# Altium footprint library PCB_BQ51013BYFPR.PcbLib: 17 footprints (part 2 of 2)
Each footprint in its own frame and in the unit in brackets; x right, y up, seen from the top. Pads: shape width x height; smd on the part's side, far side on the other; paste and mask are expansions set on the pad; w line width, h text height; cw(c..) or ccw(c..) is an arc to the next point about the centre after c.
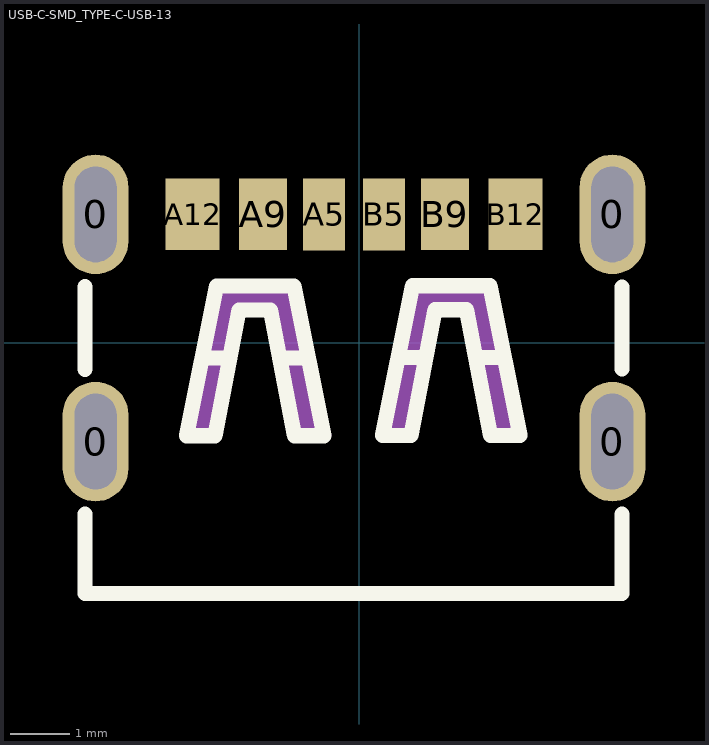
[diagram p1: the footprint, top view; thin cyan lines are the x and y axes]

## USB-C-SMD_TYPE-C-USB-13 [mm]
height 2.65
pads (10):
  oval 1.1x2 hole 0.7 slot 1.6 at 90 deg: 0(-4.407,-1.652) 0(-4.407,2.148) 0(4.233,-1.652) 0(4.233,2.148)
  rect 0.7x1.2 smd: A5(-0.587,2.146) B5(0.413,2.146)
  rect 0.8x1.2 smd: A9(-1.607,2.148) B9(1.433,2.15)
  rect 0.9x1.2 smd: A12(-2.787,2.148) B12(2.613,2.148)
Top Overlay:
  lines w0.254: -4.587,-2.862 -4.587,-4.191 4.393,-4.191 4.393,-2.867 ; -4.587,-0.442 -4.587,0.938 ; -2.586,-0.253 -2.188,-0.253 ; -1.287,-0.252 -0.887,-0.252 ; 0.69,-0.247 1.089,-0.247 ; 1.99,-0.247 2.39,-0.247 ; 4.393,-0.438 4.393,0.933 ; -2.886,-1.553 -2.411,-1.553 -2.01,0.548 -1.481,0.548 -1.083,-1.553 -0.587,-1.553 -1.088,0.949 -2.388,0.949 -2.886,-1.553 ; 0.391,-1.548 0.866,-1.548 1.267,0.553 1.795,0.553 2.194,-1.548 2.689,-1.548 2.189,0.954 0.889,0.954 0.391,-1.548
Top Paste:
  region: -4.957,2.598 -4.957,2.707 -4.873,2.909 -4.719,3.064 -4.516,3.148 -4.298,3.148 -4.095,3.064 -3.941,2.909 -3.857,2.707 -3.857,2.598 -3.857,1.698 -3.857,1.588 -3.941,1.386 -4.095,1.231 -4.298,1.148 -4.516,1.148 -4.719,1.231 -4.873,1.386 -4.957,1.588 -4.957,1.698
  region: 3.683,2.598 3.683,2.707 3.767,2.909 3.921,3.064 4.124,3.148 4.342,3.148 4.545,3.064 4.699,2.909 4.783,2.707 4.783,2.598 4.783,1.698 4.783,1.588 4.699,1.386 4.545,1.231 4.342,1.148 4.124,1.148 3.921,1.231 3.767,1.386 3.683,1.588 3.683,1.698
  region: 3.683,-1.202 3.683,-1.093 3.767,-0.891 3.921,-0.736 4.124,-0.652 4.342,-0.652 4.545,-0.736 4.699,-0.891 4.783,-1.093 4.783,-1.202 4.783,-2.102 4.783,-2.212 4.699,-2.414 4.545,-2.569 4.342,-2.652 4.124,-2.652 3.921,-2.569 3.767,-2.414 3.683,-2.212 3.683,-2.102
  region: -4.957,-1.202 -4.957,-1.093 -4.873,-0.891 -4.719,-0.736 -4.516,-0.652 -4.298,-0.652 -4.095,-0.736 -3.941,-0.891 -3.857,-1.093 -3.857,-1.202 -3.857,-2.102 -3.857,-2.212 -3.941,-2.414 -4.095,-2.569 -4.298,-2.652 -4.516,-2.652 -4.719,-2.569 -4.873,-2.414 -4.957,-2.212 -4.957,-2.102
  region: -3.237,2.748 -2.337,2.748 -2.337,1.548 -3.237,1.548
  region: -2.007,2.748 -1.207,2.748 -1.207,1.548 -2.007,1.548
  region: -0.937,2.746 -0.237,2.746 -0.237,1.546 -0.937,1.546
  region: 0.063,2.746 0.763,2.746 0.763,1.546 0.063,1.546
  region: 1.033,2.75 1.833,2.75 1.833,1.55 1.033,1.55
  region: 2.163,2.748 3.063,2.748 3.063,1.548 2.163,1.548
Mechanical 15:
  region: -2.427,-1.531 -1.967,0.509 -1.407,0.529 -1.027,-1.551 -0.467,-1.551 -1.067,0.989 -2.367,0.969 -2.867,-1.531
  region: 0.813,-1.531 1.273,0.509 1.833,0.529 2.213,-1.551 2.773,-1.551 2.173,0.989 0.873,0.969 0.373,-1.531